# Altium footprint library Miscellaneous Devices.PcbLib: 306 footprints (part 15 of 20)
Each footprint in its own frame and in the unit in brackets; x right, y up, seen from the top. Pads: shape width x height; smd on the part's side, far side on the other; paste and mask are expansions set on the pad; w line width, h text height; cw(c..) or ccw(c..) is an arc to the next point about the centre after c.
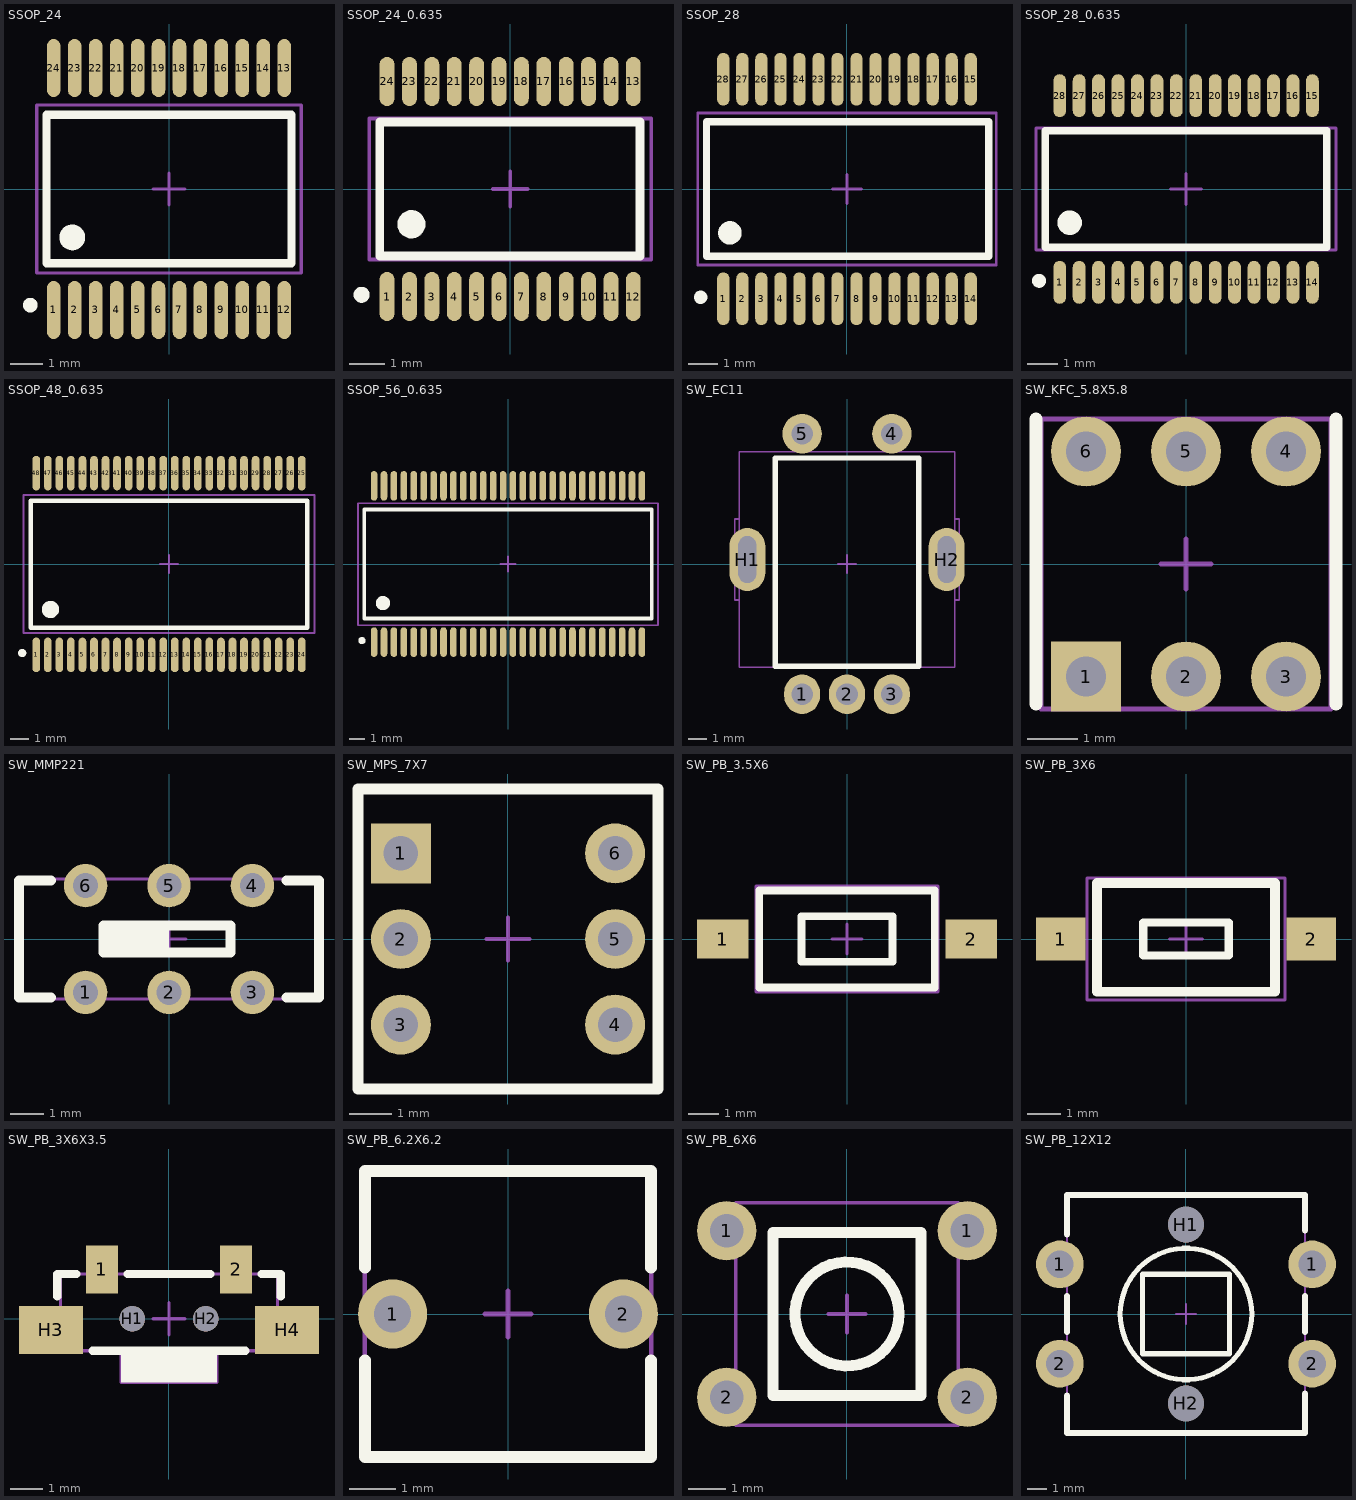
[diagram p14: the footprints below, top view; thin cyan lines are the x and y axes]

## SSOP_24 [mm] "0.65"
pads (24):
  oval 0.42x1.8 smd: 1(-3.575,-3.75) 2(-2.925,-3.75) 3(-2.275,-3.75) 4(-1.625,-3.75) 5(-0.975,-3.75) 6(-0.325,-3.75) 7(0.325,-3.75) 8(0.975,-3.75) 9(1.625,-3.75) 10(2.275,-3.75) 11(2.925,-3.75) 12(3.575,-3.75) 13(3.575,3.75) 14(2.925,3.75) 15(2.275,3.75) 16(1.625,3.75) 17(0.975,3.75) 18(0.325,3.75) 19(-0.325,3.75) 20(-0.975,3.75) 21(-1.625,3.75) 22(-2.275,3.75) 23(-2.925,3.75) 24(-3.575,3.75)
Top Overlay:
  circle w0.254: c-4.3,-3.6 r0.1
  circle w0.4: c-3,-1.5 r0.2
  lines w0.254: -3.8,-2.3 3.8,-2.3 3.8,2.3 -3.8,2.3 -3.8,-2.3
Mechanical 15:
  lines w0.1: -0.5,0 0.5,0 ; 0,-0.5 0,0.5 ; -4.1,-2.6 4.1,-2.6 4.1,2.6 -4.1,2.6 -4.1,-2.6
3D body: height 1.9, standoff 0, extent -4.1,-3.9 4.1,3.9

## SSOP_24_0.635 [mm]
pads (24):
  oval 0.42x1.4 smd: 1(-3.492,-3.05) 2(-2.857,-3.05) 3(-2.222,-3.05) 4(-1.587,-3.05) 5(-0.952,-3.05) 6(-0.317,-3.05) 7(0.318,-3.05) 8(0.953,-3.05) 9(1.588,-3.05) 10(2.223,-3.05) 11(2.858,-3.05) 12(3.493,-3.05) 13(3.493,3.05) 14(2.858,3.05) 15(2.223,3.05) 16(1.588,3.05) 17(0.953,3.05) 18(0.318,3.05) 19(-0.317,3.05) 20(-0.952,3.05) 21(-1.587,3.05) 22(-2.222,3.05) 23(-2.857,3.05) 24(-3.492,3.05)
Top Overlay:
  circle w0.4: c-2.8,-1 r0.2
  circle w0.254: c-4.217,-3 r0.1
  lines w0.254: -3.7,-1.9 3.683,-1.9 3.683,1.9 -3.7,1.9 -3.7,-1.9
Mechanical 15:
  lines w0.1: -0.5,0 0.5,0 ; 0,-0.5 0,0.5 ; -4,-2 4,-2 4,2 -4,2 -4,-2
3D body: height 1.2, standoff 0, extent -3.9,-3.2 3.9,3.2

## SSOP_28 [mm] "0.65"
pads (28):
  oval 0.42x1.8 smd: 1(-4.225,-3.75) 2(-3.575,-3.75) 3(-2.925,-3.75) 4(-2.275,-3.75) 5(-1.625,-3.75) 6(-0.975,-3.75) 7(-0.325,-3.75) 8(0.325,-3.75) 9(0.975,-3.75) 10(1.625,-3.75) 11(2.275,-3.75) 12(2.925,-3.75) 13(3.575,-3.75) 14(4.225,-3.75) 15(4.225,3.75) 16(3.575,3.75) 17(2.925,3.75) 18(2.275,3.75) 19(1.625,3.75) 20(0.975,3.75) 21(0.325,3.75) 22(-0.325,3.75) 23(-0.975,3.75) 24(-1.625,3.75) 25(-2.275,3.75) 26(-2.925,3.75) 27(-3.575,3.75) 28(-4.225,3.75)
Top Overlay:
  circle w0.254: c-5,-3.7 r0.1
  circle w0.4: c-4,-1.5 r0.2
  lines w0.254: -4.8,-2.3 4.842,-2.3 4.842,2.3 -4.8,2.3 -4.8,-2.3
Mechanical 15:
  lines w0.1: -0.5,0 0.5,0 ; 0,-0.5 0,0.5 ; -5.1,-2.6 5.1,-2.6 5.1,2.6 -5.1,2.6 -5.1,-2.6
3D body: height 1.9, standoff 0, extent -5.1,-3.9 5.1,3.9

## SSOP_28_0.635 [mm]
pads (28):
  oval 0.42x1.4 smd: 1(-4.127,-3.05) 2(-3.492,-3.05) 3(-2.857,-3.05) 4(-2.222,-3.05) 5(-1.587,-3.05) 6(-0.953,-3.05) 7(-0.318,-3.05) 8(0.318,-3.05) 9(0.953,-3.05) 10(1.587,-3.05) 11(2.222,-3.05) 12(2.857,-3.05) 13(3.492,-3.05) 14(4.127,-3.05) 15(4.127,3.05) 16(3.492,3.05) 17(2.857,3.05) 18(2.222,3.05) 19(1.587,3.05) 20(0.953,3.05) 21(0.318,3.05) 22(-0.318,3.05) 23(-0.953,3.05) 24(-1.587,3.05) 25(-2.222,3.05) 26(-2.857,3.05) 27(-3.492,3.05) 28(-4.127,3.05)
Top Overlay:
  circle w0.4: c-3.8,-1.1 r0.2
  circle w0.254: c-4.802,-3 r0.1
  lines w0.254: -4.6,-1.9 4.598,-1.9 4.598,1.9 -4.6,1.9 -4.6,-1.9
Mechanical 15:
  lines w0.1: -0.5,0 0.5,0 ; 0,-0.5 0,0.5 ; -4.9,-2 4.9,-2 4.9,2 -4.9,2 -4.9,-2
3D body: height 1.2, standoff 0, extent -4.85,-3.2 4.85,3.2

## SSOP_48_0.635 [mm] "0.635"
pads (48):
  oval 0.42x1.9 smd: 1(-7.302,-5) 2(-6.667,-5) 3(-6.032,-5) 4(-5.397,-5) 5(-4.762,-5) 6(-4.127,-5) 7(-3.492,-5) 8(-2.857,-5) 9(-2.222,-5) 10(-1.587,-5) 11(-0.952,-5) 12(-0.317,-5) 13(0.318,-5) 14(0.953,-5) 15(1.588,-5) 16(2.223,-5) 17(2.858,-5) 18(3.493,-5) 19(4.128,-5) 20(4.763,-5) 21(5.398,-5) 22(6.033,-5) 23(6.668,-5) 24(7.303,-5) 25(7.303,5) 26(6.668,5) 27(6.033,5) 28(5.398,5) 29(4.763,5) 30(4.128,5) 31(3.493,5) 32(2.858,5) 33(2.223,5) 34(1.588,5) 35(0.953,5) 36(0.318,5) 37(-0.317,5) 38(-0.952,5) 39(-1.587,5) 40(-2.222,5) 41(-2.857,5) 42(-3.492,5) 43(-4.127,5) 44(-4.762,5) 45(-5.397,5) 46(-6.032,5) 47(-6.667,5) 48(-7.302,5)
Top Overlay:
  circle w0.254: c-8.077,-4.9 r0.1
  circle w0.5: c-6.524,-2.5 r0.224
  lines w0.254: -7.6,-3.5 7.6,-3.5 7.6,3.475 -7.6,3.475 -7.6,-3.5
Mechanical 15:
  lines w0.1: -0.5,0 0.5,0 ; 0,-0.5 0,0.5 ; -8,-3.8 8,-3.8 8,3.8 -8,3.8 -8,-3.8
3D body: height 2.65, standoff 0, extent -8.002,-5.15 7.998,5.25

## SSOP_56_0.635 [mm] "0.635"
pads (56):
  oval 0.42x1.9 smd: 1(-8.572,-5) 2(-7.937,-5) 3(-7.302,-5) 4(-6.667,-5) 5(-6.032,-5) 6(-5.397,-5) 7(-4.762,-5) 8(-4.127,-5) 9(-3.492,-5) 10(-2.857,-5) 11(-2.222,-5) 12(-1.587,-5) 13(-0.952,-5) 14(-0.317,-5) 15(0.318,-5) 16(0.953,-5) 17(1.588,-5) 18(2.223,-5) 19(2.858,-5) 20(3.493,-5) 21(4.128,-5) 22(4.763,-5) 23(5.398,-5) 24(6.033,-5) 25(6.668,-5) 26(7.303,-5) 27(7.938,-5) 28(8.573,-5) 29(8.573,5) 30(7.938,5) 31(7.303,5) 32(6.668,5) 33(6.033,5) 34(5.398,5) 35(4.763,5) 36(4.128,5) 37(3.493,5) 38(2.858,5) 39(2.223,5) 40(1.588,5) 41(0.953,5) 42(0.318,5) 43(-0.317,5) 44(-0.952,5) 45(-1.587,5) 46(-2.222,5) 47(-2.857,5) 48(-3.492,5) 49(-4.127,5) 50(-4.762,5) 51(-5.397,5) 52(-6.032,5) 53(-6.667,5) 54(-7.302,5) 55(-7.937,5) 56(-8.572,5)
Top Overlay:
  circle w0.254: c-9.347,-4.9 r0.1
  circle w0.5: c-8,-2.5 r0.2
  lines w0.254: -9.2,-3.5 9.2,-3.5 9.2,3.475 -9.2,3.475 -9.2,-3.5
Mechanical 15:
  lines w0.1: -0.5,0 0.5,0 ; 0,-0.5 0,0.5 ; -9.6,-3.925 9.6,-3.925 9.6,3.875 -9.6,3.875 -9.6,-3.925
3D body: height 2.77, standoff 0, extent -9.272,-5.3 9.271,5.348

## SW_EC11 [mm]
pads (7):
  oval 2x2.2 hole 1.2: 1(-2.5,-7.25) 2(0,-7.25) 3(2.5,-7.25)
  round 2.2 hole 1.2: 4(2.5,7.25) 5(-2.5,7.25)
  oval 2x3.5 hole 1 slot 2.6 at 90 deg: H1(-5.55,0.25) H2(5.55,0.25)
Top Overlay:
  lines w0.3: -4,-5.7 -4,5.9 4,5.9 4,-5.7 -4,-5.7
Mechanical 15:
  lines w0.1: -6,-2 -6.25,-2 -6.25,2.5 -6,2.5 ; -0.5,0 0.5,0 ; 0,-0.5 0,0.5 ; 6,-2 6.25,-2 6.25,2.5 6,2.5 ; -6,-5.75 -6,6.25 6,6.25 6,-5.75 -6,-5.75
3D body: height 24.5, standoff -3.65, extent -5.9,-7.425 5.813,7.525

## SW_KFC_5.8X5.8 [mm]
pads (6):
  rect 1.4x1.4 hole 0.8: 1(-2,-2.25)
  round 1.4 hole 0.8: 2(0,-2.25) 3(2,-2.25) 4(2,2.25) 5(0,2.25) 6(-2,2.25)
Top Overlay:
  lines w0.254: -3,-2.8 -3,2.9 ; 3,-2.8 3,2.9
Mechanical 15:
  lines w0.1: -0.5,0 0.5,0 ; 0,-0.5 0,0.5 ; -2.9,-2.9 -2.9,2.9 2.9,2.9 2.9,-2.9 -2.9,-2.9
3D body: height 10, standoff -3.6, extent -2.9,-2.9 2.9,2.9

## SW_MMP221 [mm]
pads (6):
  round 1.3 hole 0.75: 1(-2.5,-1.6) 2(0,-1.6) 3(2.5,-1.6) 4(2.5,1.6) 5(0,1.6) 6(-2.5,1.6)
Top Overlay:
  rectangle: -1.96,-0.4 0,0.409
  lines w0.3: -3.547,-1.75 -4.5,-1.75 -4.5,1.75 -3.547,1.75 ; 3.528,-1.75 4.5,-1.75 4.5,1.75 3.528,1.75 ; -1.96,-0.4 1.85,-0.4 1.85,0.409 -1.96,0.409 -1.96,-0.4
Mechanical 15:
  lines w0.1: -0.5,0 0.5,0 ; 0,-0.5 0,0.5 ; -4.5,-1.8 -4.5,1.8 4.5,1.8 4.5,-1.8 -4.5,-1.8
3D body: height 5.5, standoff -2.95, extent -4.5,-1.8 4.5,1.8

## SW_MPS_7X7 [mm]
pads (6):
  rect 1.4x1.4 hole 0.8: 1(-2.5,2)
  round 1.4 hole 0.8: 2(-2.5,0) 3(-2.5,-2) 4(2.5,-2) 5(2.5,0) 6(2.5,2)
Top Overlay:
  lines w0.254: -3.5,-3.5 3.5,-3.5 3.5,3.5 -3.5,3.5 -3.5,-3.5
Mechanical 15:
  lines w0.1: -0.5,0 0.5,0 ; 0,-0.5 0,0.5 ; -3.5,-3.5 -3.5,3.5 3.5,3.5 3.5,-3.5 -3.5,-3.5
3D body: height 12.4, standoff -3.5, extent -3.5,-3.5 3.5,3.5

## SW_PB_3.5X6 [mm]
pads (2):
  rect 1.7x1.3 smd: 1(-4.1,0) 2(4.1,0)
Top Overlay:
  lines w0.254: -2.9,-1.6 -2.9,1.6 2.9,1.6 2.9,-1.6 -2.9,-1.6 ; -1.5,-0.75 1.5,-0.75 1.5,0.75 -1.5,0.75 -1.5,-0.75
Mechanical 15:
  lines w0.1: -0.5,0 0.5,0 ; 0,-0.5 0,0.5 ; -3,-1.75 3,-1.75 3,1.75 -3,1.75 -3,-1.75
3D body: height 0.4, standoff 0, extent -4,-0.5 -3,0.5
3D body: height 0.4, standoff 0, extent 3,-0.5 4,0.5
3D body: height 5, standoff 3.5, extent -1.5,-0.7 1.5,0.7
3D body: height 3.4, standoff 0, extent -3,-1.75 3,1.75
3D body: height 4, standoff 3.5, extent 2.1,-0.85 3,0.85
3D body: height 4, standoff 3.5, extent -3,-0.75 -2.1,0.95
3D body: height 3.5, standoff 3.4, extent -3,-1.75 3,1.75

## SW_PB_3X6 [mm]
pads (2):
  rect 1.5x1.3 smd: 1(-3.8,0) 2(3.8,0)
Top Overlay:
  lines w0.254: -1.3,-0.5 1.3,-0.5 1.3,0.5 -1.3,0.5 -1.3,-0.5
  lines w0.3: -2.7,-1.6 2.7,-1.6 2.7,1.7 -2.7,1.7 -2.7,-1.6
Mechanical 15:
  lines w0.1: -0.5,0 0.5,0 ; 0,-0.5 0,0.5 ; -3,-1.85 -3,1.85 3,1.85 3,-1.85 -3,-1.85
3D body: height 2.6, standoff -0.05, extent -4,-1.85 4,1.85

## SW_PB_3X6X3.5 [mm]
pads (6):
  rect 1x1.5 smd: 1(-2.1,1.55) 2(2.1,1.55)
  round 0.8 hole 0.8 unplated: H1(-1.15,0) H2(1.15,0)
  rect 2x1.5 smd: H3(-3.7,-0.35) H4(3.7,-0.35)
Top Overlay:
  rectangle: -1.5,-2 1.5,-1
  lines w0.254: -3.5,0.7 -3.5,1.4 -2.9,1.4 ; -2.4,-1 2.4,-1 ; -1.3,1.4 1.3,1.4 ; 2.9,1.4 3.5,1.4 3.5,0.7
Mechanical 15:
  lines w0.1: -1.5,-1 -1.5,-2 1.5,-2 1.5,-1 ; -0.5,0 0.5,0 ; 0,-0.5 0,0.5 ; -3.4,-1 -3.4,1.4 3.4,1.4 3.4,-1 -3.4,-1
3D body: height 3.5, standoff 0, extent -3.9,-2.05 3.9,1.55

## SW_PB_6.2X6.2 [mm]
pads (2):
  round 1.5 hole 0.8: 1(-2.5,0) 2(2.5,0)
Top Overlay:
  lines w0.254: -3.1,-1 -3.1,-3.1 3.1,-3.1 3.1,-1 ; -3.1,1 -3.1,3.1 3.1,3.1 3.1,1
Mechanical 15:
  lines w0.1: -0.5,0 0.5,0 ; 0,-0.5 0,0.5 ; -3.1,-3.1 3.1,-3.1 3.1,3.1 -3.1,3.1 -3.1,-3.1
3D body: height 3.5, standoff 0, extent -3.1,-3.1 3.1,3.1
3D body: height 6.6, standoff 3.5, extent -2.6,-2.7 2.7,2.6
3D body: height 4, standoff 3.5, extent 1.753,-3 3.047,-1.703
3D body: height 4, standoff 3.5, extent -3.047,-3 -1.753,-1.703
3D body: height 4, standoff 3.5, extent -3.047,1.7 -1.753,2.997
3D body: height 4, standoff 3.5, extent 1.753,1.7 3.047,2.997
3D body: height 7.3, standoff 6.6, extent -1.494,-1.5 1.494,1.494
3D body: height 0, standoff -1, extent 2.202,-0.299 2.8,0.299
3D body: height 0, standoff -1, extent -2.799,-0.299 -2.201,0.3

## SW_PB_6X6 [mm]
pads (4):
  round 1.6 hole 0.9: 1(-3.25,2.25) 1(3.25,2.25) 2(-3.25,-2.25) 2(3.25,-2.25)
Top Overlay:
  circle w0.3: c0,0 r1.404
  lines w0.3: -2,-2.2 2,-2.2 2,2.2 -2,2.2 -2,-2.2
Mechanical 15:
  lines w0.1: -0.5,0 0.5,0 ; 0,-0.5 0,0.5 ; -3,-3 -3,3 3,3 3,-3 -3,-3
3D body: height 5.1, standoff -3.16, extent -3.96,-3.1 3.96,3.1

## SW_PB_12X12 [mm]
pads (6):
  round 2.4 hole 1.4: 1(-6.35,2.5) 1(6.35,2.5) 2(-6.35,-2.5) 2(6.35,-2.5)
  round 1.8 hole 1.8 unplated: H1(0,4.5) H2(0,-4.5)
Top Overlay:
  circle w0.254: c0,0 r3.312
  lines w0.254: -2.2,-2 2.2,-2 2.2,2 -2.2,2 -2.2,-2
  lines w0.3: -6,-4.1 -6,-6 6,-6 6,-4 ; -6,-0.9 -6,0.9 ; -6,4 -6,6 6,6 6,4.2 ; 6,-0.9 6,0.9
Mechanical 15:
  lines w0.1: -0.5,0 0.5,0 ; 0,-0.5 0,0.5 ; -6,-6 6,-6 6,6 -6,6 -6,-6
3D body: height 7.3, standoff -3.5, extent -6.5,-6 6.5,6